# Altium schematic symbol library PMBT2222A.SchLib: 1 symbol
Pins are listed as number, name and electrical type; pins without a type are passive.

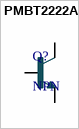
[diagram p0: symbol PMBT2222A]

## PMBT2222A
designator Q?, comment NPN
Bipolar (BJT) Transistor NPN 40V 600mA 300MHz 250mW Surface Mount TO-236AB; MF: Infineon; MP: PMBT2222A; Price: None; Purchase-URL: https://pricing.snapeda.com/search/part/PMBT2222A/?ref=eda; Package: SOT-23-3 Infineon; Check_prices: https://www.snapeda.com/parts/PMBT2222A/Infineon/view-part/?ref=eda; Availability: In Stock; Value: *; SnapEDA_Link: https://www.snapeda.com/parts/PMBT2222A/Infineon/view-part/?ref=snap
footprint PMBT2222A (TO-236AB)
pins: 1 B, 2 E, 3 C